# Altium schematic symbol library 8SS1012-Z.SchLib: 1 symbol
Pins are listed as number, name and electrical type; pins without a type are passive.

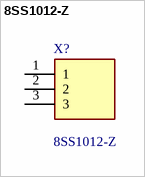
[diagram p0: symbol 8SS1012-Z]

## 8SS1012-Z
designator X?
NIDEC COPAL ELECTRONICS - 8SS1012-Z - SLIDE SWITCH, SPDT, 6A, 125VAC, TH; Geometry.Height: 14.75mm; Mouser Part Number: *; Mouser Price/Stock: *; Manufacturer_Name: Copal Electronics; Manufacturer_Part_Number: 8SS1012-Z; Datasheet Link: https://www.nidec-copal-electronics.com/e/catalog/switch/8ss.pdf
footprint 8SS1012Z
pins: 1, 2, 3